# Altium schematic symbol library Schlib1.SchLib: 10 symbols
Pins are listed as number, name and electrical type; pins without a type are passive.

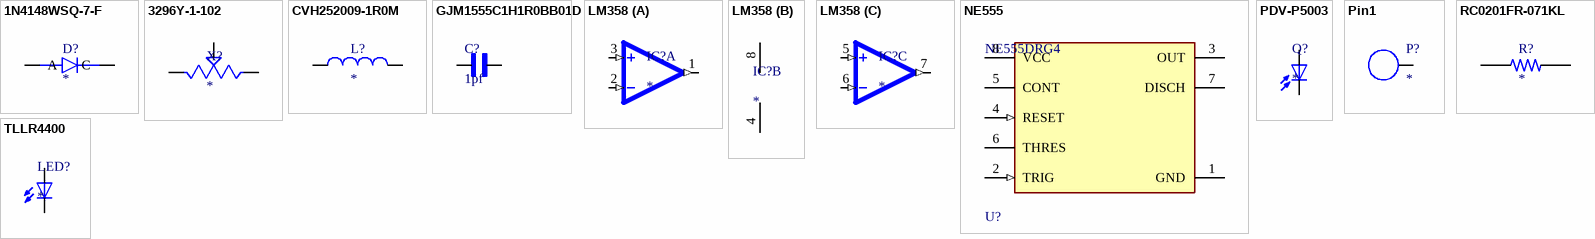
[diagram p0: symbols 1N4148WSQ-7-F to TLLR4400]

## 1N4148WSQ-7-F
designator D?
Diode Standard 75 V 150mA Surface Mount SOD-323; MF: Diodes Inc.; MP: 1N4148WSQ-7-F; SnapEDA_Link: https://www.snapeda.com/parts/1N4148WSQ-7-F/Diodes+Inc./view-part/?ref=snap; Package: SOD-323 Diodes Inc.; Value: *; Check_prices: https://www.snapeda.com/parts/1N4148WSQ-7-F/Diodes+Inc./view-part/?ref=eda
footprint SOD2513X120N
pins: A, C

## 3296Y-1-102
designator X?
MP: 3296Y-1-102; Package: None; Price: None; Availability: Unavailable; Value: *
footprint TRIM_3296Y-1-102
pins: 1 CCW, 2 WIPER, 3 CW

## CVH252009-1R0M
designator L?
1 ÂµH Shielded Multilayer Inductor 1.6 A 55mOhm Max 1008 (2520 Metric); MP: CVH252009-1R0M; MF: Bourns; Package: 1008 Bourns; Availability: In Stock; Value: *; Purchase-URL: https://pricing.snapeda.com/search/part/CVH252009-1R0M/?ref=eda; Check_prices: https://www.snapeda.com/parts/CVH252009-1R0M/Bourns/view-part/?ref=eda; Price: None; SnapEDA_Link: https://www.snapeda.com/parts/CVH252009-1R0M/Bourns/view-part/?ref=snap
footprint INDC2520X100N
pins: 1, 2

## GJM1555C1H1R0BB01D
designator C?, comment 1pf
0402 1 pF 50 V Â±0.1 pF Tolerance C0G SMT Multilayer Ceramic Capacitor; MF: Murata; MP: GJM1555C1H1R0BB01D; SnapEDA_Link: https://www.snapeda.com/parts/GJM1555C1H1R0BB01D/Murata/view-part/?ref=snap; Package: 1005 Taiyo Yuden; Value: *; Check_prices: https://www.snapeda.com/parts/GJM1555C1H1R0BB01D/Murata/view-part/?ref=eda
footprint CAPC1005X55N
pins: 1, 2

## LM358
designator IC?
MF: UTC; MP: LM358; SnapEDA_Link: https://www.snapeda.com/parts/LM358/UTC/view-part/?ref=snap; Package: None; Value: *; Check_prices: https://www.snapeda.com/parts/LM358/UTC/view-part/?ref=eda
footprint SO8
part A pins: 1 OUT (out), 2 -IN (in), 3 +IN (in)
part B pins: 4 V- (power), 8 V+ (power)
part C pins: 5 +IN (in), 6 -IN (in), 7 OUT (out)

## NE555
designator U?, comment NE555DRG4
IC OSC SGL TIMER 100KHZ 8-SOIC; Number of Timers/Counters: 1; Min Supply Voltage: 4.5V; Quiescent Current: 15mA; Nominal Supply Current: 2mA; Max Supply Voltage: 16V; Low Level Output Current: 200mA; Operating Supply Current: 10mA; High Level Output Current: -200mA; Height: 1.58mm; Max Operating Temperature: 70°C; Case/Package: SOIC; Package Quantity: 2500; RoHS Compliant: Yes; Min Operating Temperature: 0°C; Frequency: 100kHz; Width: 3.91mm; Mount: Surface Mount; Number of Pins: 8; Packaging: Tape and Reel; Supply Current: 2mA; Length: 4.9mm; Series: -; Weight: 0.002561oz; Radiation Hardening: No; Lead Free: Lead Free
footprint SO-8 (SOP, 8-Leads, Body 4,90x3,90mm, Pitch 1,27mm, IPC Low Density)
pins: 1 GND (power), 2 TRIG (in), 3 OUT, 4 RESET (in), 5 CONT, 6 THRES, 7 DISCH, 8 VCC (power)

## PDV-P5003
designator Q?
CDS Cells 520nm 12 ~ 58kOhms @ 10 lux; MF: Vishay; MP: TLLR4400; SnapEDA_Link: https://www.snapeda.com/parts/TLLR4400/Vishay+Semiconductor+Opto+Division/view-part/?ref=snap; Package: None; Value: *; Check_prices: https://www.snapeda.com/parts/TLLR4400/Vishay+Semiconductor+Opto+Division/view-part/?ref=eda
footprint XDCR_PDV-P8003
pins: A, C

## Pin1
designator P?
footprint Pin1
pins: 0

## RC0201FR-071KL
designator R?
1 kOhms Â±1% 0.05W, 1/20W Chip Resistor 0201 (0603 Metric) Moisture Resistant Thick Film; MF: Yageo; MP: RC0201FR-071KL; SnapEDA_Link: https://www.snapeda.com/parts/RC0201FR-071KL/Yageo/view-part/?ref=snap; Package: 0201 Yageo; Value: *; Check_prices: https://www.snapeda.com/parts/RC0201FR-071KL/Yageo/view-part/?ref=eda
footprint RESC0603X26N
pins: 1, 2

## TLLR4400
designator LED?
Red 619nm LED Indication - Discrete 1.9V Radial; MF: Vishay; MP: TLLR4400; SnapEDA_Link: https://www.snapeda.com/parts/TLLR4400/Vishay+Semiconductor+Opto+Division/view-part/?ref=snap; Package: None; Value: *; Check_prices: https://www.snapeda.com/parts/TLLR4400/Vishay+Semiconductor+Opto+Division/view-part/?ref=eda
footprint LED3MM IR
pins: A, C